# Altium footprint library PM.PcbLib: 38 footprints (part 2 of 3)
Each footprint in its own frame and in the unit in brackets; x right, y up, seen from the top. Pads: shape width x height; smd on the part's side, far side on the other; paste and mask are expansions set on the pad; w line width, h text height; cw(c..) or ccw(c..) is an arc to the next point about the centre after c.
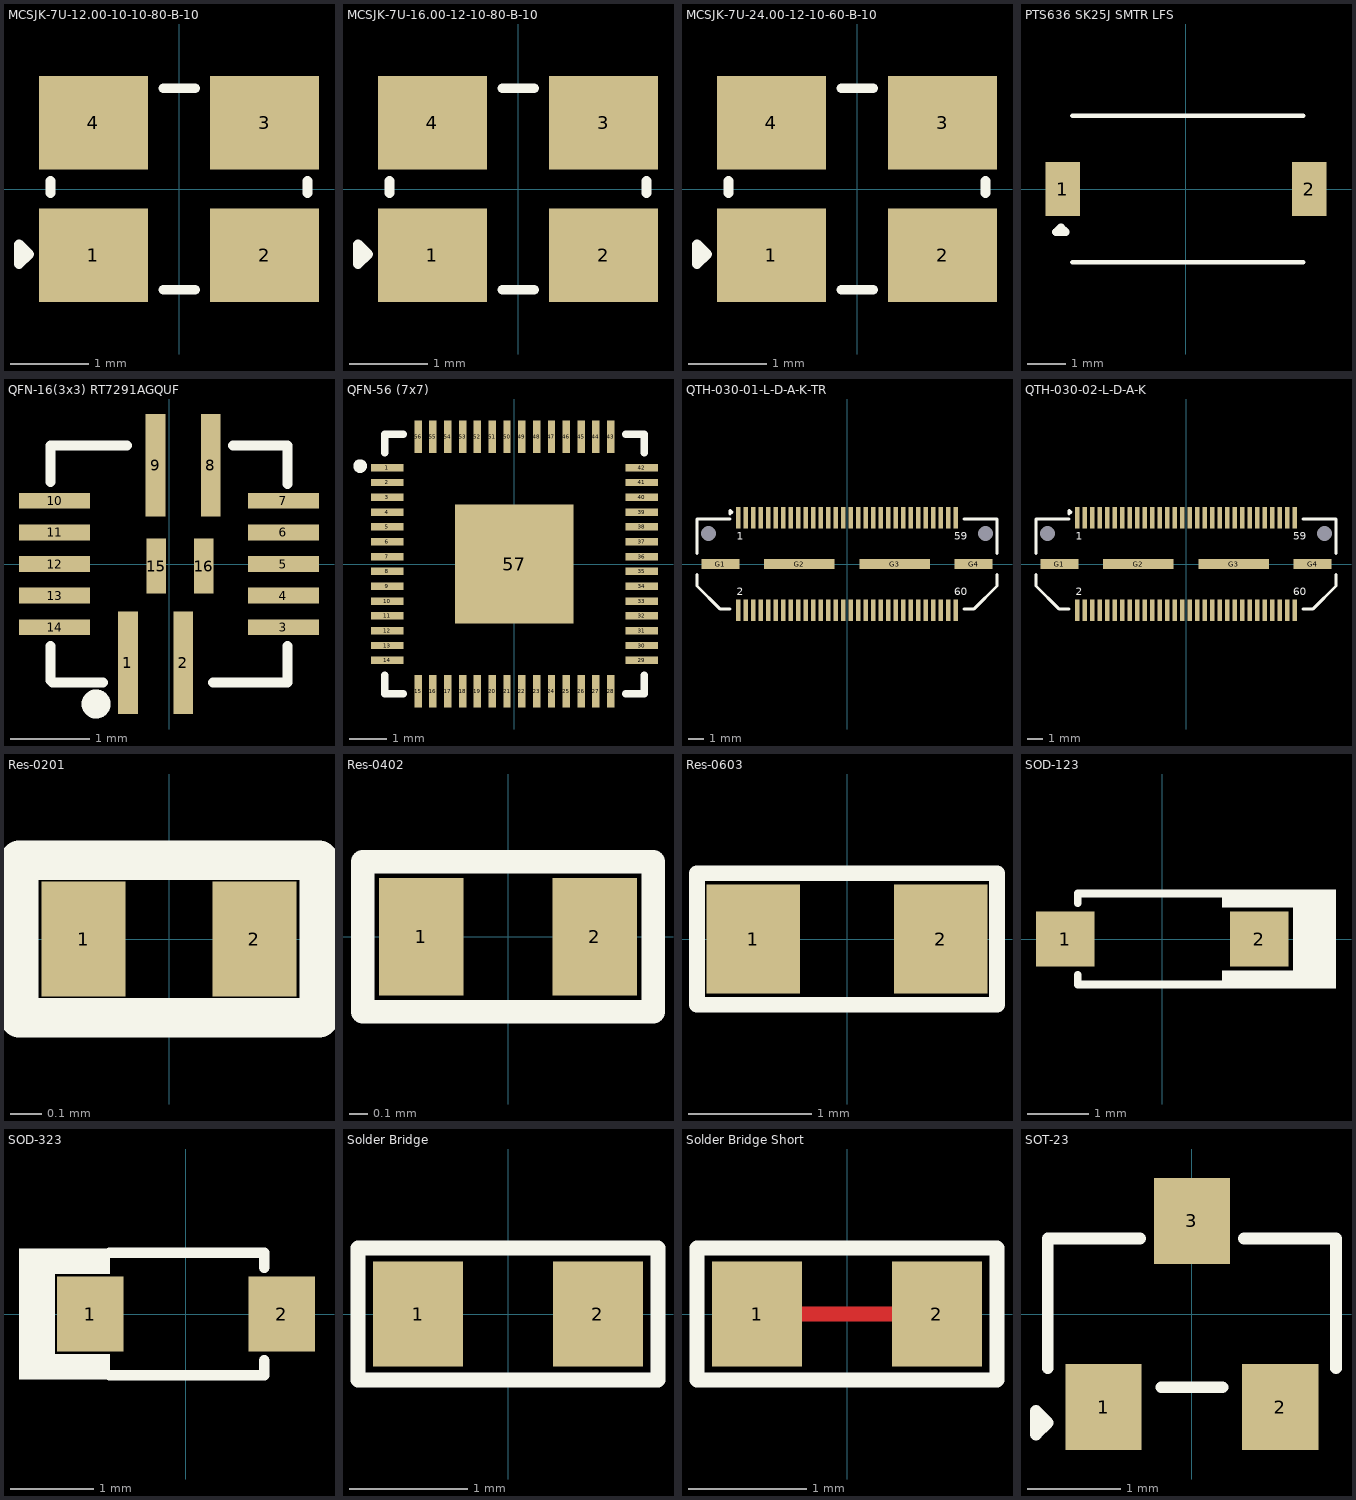
[diagram p1: the footprints below, top view; thin cyan lines are the x and y axes]

## MCSJK-7U-12.00-10-10-80-B-10 [mm]
pads (4):
  rect 1.4x1.2 smd mask+0.07: 1(-1.1,-0.85) 2(1.1,-0.85) 3(1.1,0.85) 4(-1.1,0.85)
Top Overlay:
  lines w0.127: -1.651,-0.051 -1.651,0.102 ; -0.203,-1.295 0.203,-1.295 ; -0.203,1.295 0.203,1.295 ; 1.651,-0.051 1.651,0.102 ; -2.057,-0.965 -2.057,-0.711 -1.93,-0.838 -2.057,-0.965
3D body "User Library-XTAL-3_2x2_5.step": height 0.91, standoff -0.01, extent -1.6,-1.25 1.6,1.25

## MCSJK-7U-16.00-12-10-80-B-10 [mm]
pads (4):
  rect 1.4x1.2 smd mask+0.07: 1(-1.1,-0.85) 2(1.1,-0.85) 3(1.1,0.85) 4(-1.1,0.85)
Top Overlay:
  lines w0.127: -1.651,-0.051 -1.651,0.102 ; -0.203,-1.295 0.203,-1.295 ; -0.203,1.295 0.203,1.295 ; 1.651,-0.051 1.651,0.102 ; -2.057,-0.965 -2.057,-0.711 -1.93,-0.838 -2.057,-0.965
3D body "User Library-XTAL-3_2x2_5.step": height 0.91, standoff -0.01, extent -1.6,-1.25 1.6,1.25

## MCSJK-7U-24.00-12-10-60-B-10 [mm]
pads (4):
  rect 1.4x1.2 smd mask+0.07: 1(-1.1,-0.85) 2(1.1,-0.85) 3(1.1,0.85) 4(-1.1,0.85)
Top Overlay:
  lines w0.127: -1.651,-0.051 -1.651,0.102 ; -0.203,-1.295 0.203,-1.295 ; -0.203,1.295 0.203,1.295 ; 1.651,-0.051 1.651,0.102 ; -2.057,-0.965 -2.057,-0.711 -1.93,-0.838 -2.057,-0.965
3D body "User Library-XTAL-3_2x2_5.step": height 0.91, standoff -0.01, extent -1.6,-1.25 1.6,1.25

## PTS636 SK25J SMTR LFS [mm]
pads (2):
  rect 0.9x1.4 smd: 1(-3.2,0) 2(3.2,0)
Top Overlay:
  lines w0.127: -2.952,-1.905 3.048,-1.905 ; -2.952,1.905 3.048,1.905
  lines w0.2: -3.378,-1.118 -3.124,-1.118 -3.251,-0.991 -3.378,-1.118

## QFN-16(3x3) RT7291AGQUF [mm]
pads (16):
  rect 0.25x1.3 smd paste+0 mask+0.051: 1(-0.52,-1.25) 2(0.18,-1.25) 8(0.53,1.25) 9(-0.17,1.25)
  rect 0.9x0.2 smd paste+0 mask+0.051: 3(1.45,-0.8) 4(1.45,-0.4) 5(1.45,0) 6(1.45,0.4) 7(1.45,0.8) 10(-1.45,0.8) 11(-1.45,0.4) 12(-1.45,0) 13(-1.45,-0.4) 14(-1.45,-0.8)
  rect 0.25x0.7 smd paste+0 mask+0.051: 15(-0.16,-0.025) 16(0.44,-0.025)
Top Overlay:
  circle w0.254: c-0.924,-1.773 r0.057
  lines w0.127: -1.499,-1.041 -1.499,-1.473 -1.473,-1.499 -0.838,-1.499 ; -1.499,1.041 -1.499,1.499 -0.534,1.499 ; 0.559,-1.499 1.498,-1.499 1.498,-1.041 ; 0.813,1.499 1.498,1.499 1.498,1.016
3D body "RT7291AGQUF.STEP": height 0.53, standoff 0, extent -1.51,-1.51 1.51,1.51

## QFN-56 (7x7) [mm]
pads (57):
  rect 0.875x0.2 smd: 1(-3.438,2.6) 2(-3.438,2.2) 3(-3.438,1.8) 4(-3.438,1.4) 5(-3.438,1) 6(-3.438,0.6) 7(-3.438,0.2) 8(-3.438,-0.2) 9(-3.438,-0.6) 10(-3.438,-1) 11(-3.438,-1.4) 12(-3.438,-1.8) 13(-3.438,-2.2) 14(-3.438,-2.6) 29(3.438,-2.6) 30(3.438,-2.2) 31(3.438,-1.8) 32(3.438,-1.4) 33(3.438,-1) 34(3.438,-0.6) 35(3.438,-0.2) 36(3.438,0.2) 37(3.438,0.6) 38(3.438,1) 39(3.438,1.4) 40(3.438,1.8) 41(3.438,2.2) 42(3.438,2.6)
  rect 0.2x0.875 smd: 15(-2.6,-3.438) 16(-2.2,-3.438) 17(-1.8,-3.438) 18(-1.4,-3.438) 19(-1,-3.438) 20(-0.6,-3.438) 21(-0.2,-3.438) 22(0.2,-3.438) 23(0.6,-3.438) 24(1,-3.438) 25(1.4,-3.438) 26(1.8,-3.438) 27(2.2,-3.438) 28(2.6,-3.438) 43(2.6,3.438) 44(2.2,3.438) 45(1.8,3.438) 46(1.4,3.438) 47(1,3.438) 48(0.6,3.438) 49(0.2,3.438) 50(-0.2,3.438) 51(-0.6,3.438) 52(-1,3.438) 53(-1.4,3.438) 54(-1.8,3.438) 55(-2.2,3.438) 56(-2.6,3.438)
  rect 3.2x3.2 smd: 57(0,0)
Top Overlay:
  circle w0.254: c-4.166,2.642 r0.057
  lines w0.2: -3.5,-3 -3.5,-3.5 -3,-3.5 ; -3.5,3 -3.5,3.5 -3,3.5 ; 3,-3.5 3.5,-3.5 3.5,-3 ; 3,3.5 3.5,3.5 3.5,3
3D body "RASPBERRY-PI RP2040TR7.STEP": height 0.9, standoff 0, extent -3.5,-3.5 3.5,3.5

## QTH-030-01-L-D-A-K-TR [mm]
pads (66):
  rect 0.305x1.45 smd: 01(-7.25,3.086) 02(-7.25,-3.086) 03(-6.75,3.086) 04(-6.75,-3.086) 05(-6.25,3.086) 06(-6.25,-3.086) 07(-5.75,3.086) 08(-5.75,-3.086) 09(-5.25,3.086) 10(-5.25,-3.086) 11(-4.75,3.086) 12(-4.75,-3.086) 13(-4.25,3.086) 14(-4.25,-3.086) 15(-3.75,3.086) 16(-3.75,-3.086) 17(-3.25,3.086) 18(-3.25,-3.086) 19(-2.75,3.086) 20(-2.75,-3.086) 21(-2.25,3.086) 22(-2.25,-3.086) 23(-1.75,3.086) 24(-1.75,-3.086) 25(-1.25,3.086) 26(-1.25,-3.086) 27(-0.75,3.086) 28(-0.75,-3.086) 29(-0.25,3.086) 30(-0.25,-3.086) 31(0.25,3.086) 32(0.25,-3.086) 33(0.75,3.086) 34(0.75,-3.086) 35(1.25,3.086) 36(1.25,-3.086) 37(1.75,3.086) 38(1.75,-3.086) 39(2.25,3.086) 40(2.25,-3.086) 41(2.75,3.086) 42(2.75,-3.086) 43(3.25,3.086) 44(3.25,-3.086) 45(3.75,3.086) 46(3.75,-3.086) 47(4.25,3.086) 48(4.25,-3.086) 49(4.75,3.086) 50(4.75,-3.086) 51(5.25,3.086) 52(5.25,-3.086) 53(5.75,3.086) 54(5.75,-3.086) 55(6.25,3.086) 56(6.25,-3.086) 57(6.75,3.086) 58(6.75,-3.086) 59(7.25,3.086) 60(7.25,-3.086)
  rect 2.54x0.64 smd: G1(-8.445,0) G4(8.445,0)
  rect 4.7x0.64 smd: G2(-3.175,0) G3(3.175,0)
  round 0 hole 1.02 unplated: ""(-9.24,2.03) ""(9.24,2.03)
Top Overlay:
  lines w0.2: -10,-0.7 -10,-1.461 -8.476,-2.985 -7.8,-2.985 ; -10,0.7 -10,2.985 -7.8,2.985 ; 7.8,-2.985 8.476,-2.985 10,-1.461 10,-0.7 ; 7.8,2.985 10,2.985 10,0.7 ; -7.8,3.327 -7.673,3.454 -7.8,3.581 -7.8,3.327
  text "60" at 7.134,-2.083 h0.5
  text "59" at 7.134,1.6 h0.5
  text "1" at -7.366,1.6 h0.5
  text "2" at -7.366,-2.083 h0.5
3D body "QTH-030-01-L-D-A-K-TR.stp": height 4.37, standoff -0.79, extent -10.001,-3.556 10.001,3.556

## QTH-030-02-L-D-A-K [mm]
pads (66):
  rect 0.305x1.45 smd: 01(-7.25,3.086) 02(-7.25,-3.086) 03(-6.75,3.086) 04(-6.75,-3.086) 05(-6.25,3.086) 06(-6.25,-3.086) 07(-5.75,3.086) 08(-5.75,-3.086) 09(-5.25,3.086) 10(-5.25,-3.086) 11(-4.75,3.086) 12(-4.75,-3.086) 13(-4.25,3.086) 14(-4.25,-3.086) 15(-3.75,3.086) 16(-3.75,-3.086) 17(-3.25,3.086) 18(-3.25,-3.086) 19(-2.75,3.086) 20(-2.75,-3.086) 21(-2.25,3.086) 22(-2.25,-3.086) 23(-1.75,3.086) 24(-1.75,-3.086) 25(-1.25,3.086) 26(-1.25,-3.086) 27(-0.75,3.086) 28(-0.75,-3.086) 29(-0.25,3.086) 30(-0.25,-3.086) 31(0.25,3.086) 32(0.25,-3.086) 33(0.75,3.086) 34(0.75,-3.086) 35(1.25,3.086) 36(1.25,-3.086) 37(1.75,3.086) 38(1.75,-3.086) 39(2.25,3.086) 40(2.25,-3.086) 41(2.75,3.086) 42(2.75,-3.086) 43(3.25,3.086) 44(3.25,-3.086) 45(3.75,3.086) 46(3.75,-3.086) 47(4.25,3.086) 48(4.25,-3.086) 49(4.75,3.086) 50(4.75,-3.086) 51(5.25,3.086) 52(5.25,-3.086) 53(5.75,3.086) 54(5.75,-3.086) 55(6.25,3.086) 56(6.25,-3.086) 57(6.75,3.086) 58(6.75,-3.086) 59(7.25,3.086) 60(7.25,-3.086)
  rect 2.54x0.64 smd: G1(-8.445,0) G4(8.445,0)
  rect 4.7x0.64 smd: G2(-3.175,0) G3(3.175,0)
  round 0 hole 1.02 unplated: ""(-9.24,2.03) ""(9.24,2.03)
Top Overlay:
  lines w0.2: -10,-0.7 -10,-1.461 -8.476,-2.985 -7.8,-2.985 ; -10,0.7 -10,2.985 -7.8,2.985 ; 7.8,-2.985 8.476,-2.985 10,-1.461 10,-0.7 ; 7.8,2.985 10,2.985 10,0.7 ; -7.8,3.327 -7.673,3.454 -7.8,3.581 -7.8,3.327
  text "60" at 7.134,-2.083 h0.5
  text "59" at 7.134,1.6 h0.5
  text "1" at -7.366,1.6 h0.5
  text "2" at -7.366,-2.083 h0.5
3D body "QTH-030-02-L-D-A-K.step": height 7.36, standoff -0.8, extent -10.001,-3.556 10.001,3.556

## Res-0201 [mm]
pads (2):
  rect 0.27x0.37 smd mask+0.055: 1(-0.275,0) 2(0.275,0)
Top Overlay:
  lines w0.127: -0.483,-0.254 0.483,-0.254 0.483,0.254 -0.483,0.254 -0.483,-0.254
3D body "User Library-0201(0603M) Res.step": height 0.29, standoff -0.02, extent -0.305,-0.152 0.305,0.153

## Res-0402 [mil]
pads (2):
  rect 18x25 smd mask+2.17: 1(-18.5,0) 2(18.5,0)
Top Overlay:
  lines w0.13: -32,-17 32,-17
  lines w5: -31,-16 31,-16 31,16 -31,16 -31,-16
3D body "User Library-RES_1005-0402.step": height 16.14, standoff 0, extent -22.63,-10.82 22.64,10.83

## Res-0603 [mil]
pads (2):
  rect 30x35 smd: 1(-30,0) 2(30,0)
Top Overlay:
  lines w5: -48,-21 -48,21 48,21 48,-21 -48,-21
3D body "User Library-RESC1608X05N.step": height 17.76, standoff 0, extent -30.52,-16.74 30.51,16.73

## SOD-123 [mm]
pads (2):
  rect 0.95x0.9 smd: 1(-1.575,0) 2(1.575,0)
Top Overlay:
  rectangle: 0.965,-0.8 2.819,-0.508
  rectangle: 2.12,-0.787 2.819,0.787
  rectangle: 0.965,0.508 2.819,0.8
  lines w0.127: -1.372,-0.584 -1.372,-0.737 0.965,-0.737 ; -1.372,0.584 -1.372,0.737 0.965,0.737
3D body "1N5819HW-7-F--3DModel-STEP-56544.STEP": height 1.5, standoff -0.03, extent -1.825,-0.775 1.825,0.775

## SOD-323 [mm]
pads (2):
  rect 0.8x0.9 smd mask+0.055: 1(-1.15,0) 2(1.15,0)
Top Overlay:
  rectangle: -2.007,-0.508 -1.575,0.508
  rectangle: -2.007,-0.787 -0.914,-0.483
  rectangle: -2.007,0.483 -0.914,0.787
  lines w0.127: -0.914,-0.737 0.94,-0.737 0.94,-0.559 ; -0.914,0.737 0.94,0.737 0.94,0.559
3D body "User Library-SOD323-1.step": height 1.1, standoff 0, extent -1.3,-0.675 1.3,0.675

## Solder Bridge [mil] "Solder Bridge ON"
pads (2):
  rect 30x35 smd: 1(-30,0) 2(30,0)
Top Overlay:
  lines w5: -50,-22 50,-22 50,22 -50,22 -50,-22

## Solder Bridge Short [mil] "Solder Bridge ON"
pads (2):
  rect 30x35 smd: 1(-30,0) 2(30,0)
Top Layer:
  lines w5: -29,0 30,0
Top Overlay:
  lines w5: -50,-22 -50,22 50,22 50,-22 -50,-22

## SOT-23 [mm] "TRANS NPN 40V 0.6A SOT23"
pads (3):
  rect 0.82x0.92 smd: 1(-0.95,-1) 2(0.95,-1) 3(0,1)
Top Overlay:
  lines w0.127: -1.549,-0.584 -1.549,0.813 -0.559,0.813 ; -0.33,-0.787 0.33,-0.787 ; 0.559,0.813 1.549,0.813 1.549,-0.584 ; -1.676,-1.295 -1.549,-1.168 -1.676,-1.041 -1.676,-1.295
3D body "CircuitWorks-SOT-23.step": height 1.05, standoff -0.05, extent -1.5,-1.25 1.5,1.25